# EAGLE library part ADXL345-GY291 (library moto-anomaly)
ADXL345-GY291 GY-291 ADXL345 ivmeolcer (SPI kullanimi). Motor blogu / salincak. Kart: 20.0 x 16.0 mm - Guven: M STEP: GrabCAD 'GY-291 ADXL345'
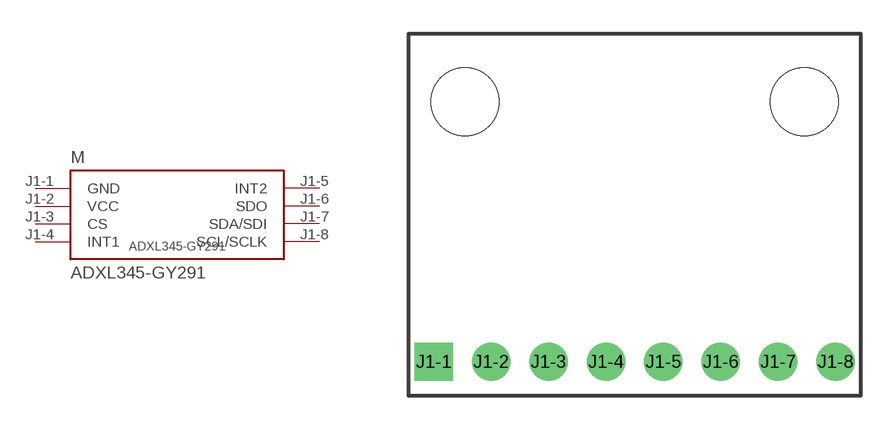
[diagram p2: symbol with the pads of ADXL345-GY291; footprint ADXL345-GY291]

Designator prefix M

## ADXL345-GY291 (BOARD_SIZE: 20.0x16.0mm; CONFIDENCE: M)  [ADXL345-GY291]
J1-1  GND  pas
J1-2  VCC  pas
J1-3  CS  pas
J1-4  INT1  pas
J1-5  INT2  pas
J1-6  SDO  pas
J1-7  SDA/SDI  pas
J1-8  SCL/SCLK  pas

## Footprint ADXL345-GY291 (pad centres in mm)
GY-291 ADXL345 ivmeolcer (SPI kullanimi). Motor blogu / salincak. | Kart: 20.0 x 16.0 mm | Guven: M
drill 1 pad 1.7 square: J1-1 -8.89,-6.5
drill 1 pad 1.7 round: J1-2 -6.35,-6.5; J1-3 -3.81,-6.5; J1-4 -1.27,-6.5; J1-5 1.27,-6.5; J1-6 3.81,-6.5; J1-7 6.35,-6.5; J1-8 8.89,-6.5
hole 3 at -7.5,5
hole 3 at 7.5,5